# Altium footprint library Connector_127mm.PcbLib: 27 footprints (part 1 of 2)
Each footprint in its own frame and in the unit in brackets; x right, y up, seen from the top. Pads: shape width x height; smd on the part's side, far side on the other; paste and mask are expansions set on the pad; w line width, h text height; cw(c..) or ccw(c..) is an arc to the next point about the centre after c.
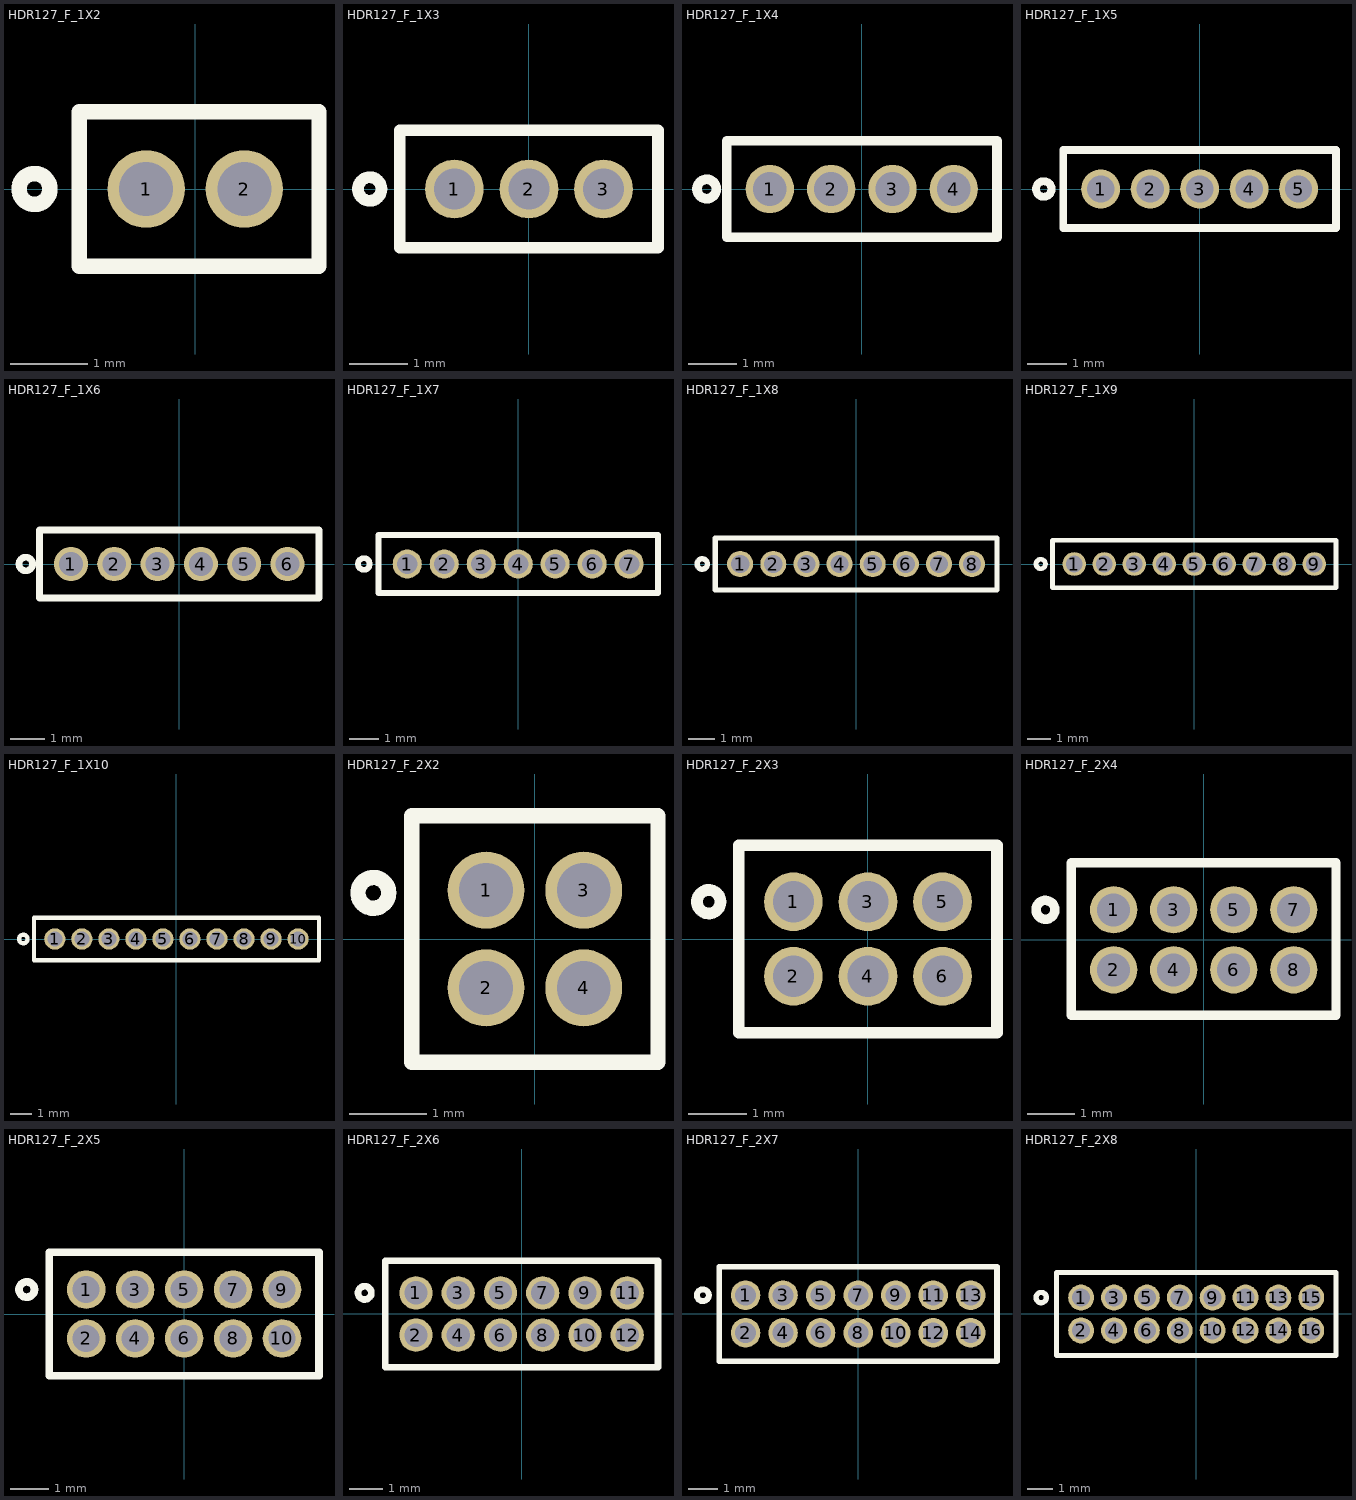
[diagram p0: the footprints below, top view; thin cyan lines are the x and y axes]

## HDR127_F_1X2 [mm] "mini header (50mil pitch)"
pads (2):
  round 1 / inner round 1 / far side oval 1x1.4 hole 0.7 mask+0.05: 1(-0.635,0) 2(0.635,0)
Top Overlay:
  circle w0.2: c-2.078,0 r0.2
  lines w0.2: -1.5,-1 -1.5,1 1.6,1 1.6,-1 -1.5,-1
3D body "female_header_a-bl127-eg-g02d.step": height 3.45, standoff -2.35, extent -1.47,-0.9 1.275,0.9

## HDR127_F_1X3 [mm] "mini header (50mil pitch)"
pads (3):
  round 1 / inner round 1 / far side oval 1x1.4 hole 0.7 mask+0.05: 1(-1.27,0) 2(0,0) 3(1.27,0)
Top Overlay:
  circle w0.2: c-2.713,0 r0.2
  lines w0.2: -2.2,-1 2.2,-1 2.2,1 -2.2,1 -2.2,-1
3D body "female_header_a-bl127-eg-g03d.stp": height 3.45, standoff -2.35, extent -2.105,-0.9 2.105,0.9

## HDR127_F_1X4 [mm] "mini header (50mil pitch)"
pads (4):
  round 1 / inner round 1 / far side oval 1x1.4 hole 0.7 mask+0.05: 1(-1.905,0) 2(-0.635,0) 3(0.635,0) 4(1.905,0)
Top Overlay:
  circle w0.2: c-3.213,0 r0.2
  lines w0.2: -2.8,-1 -2.8,1 2.8,1 2.8,-1 -2.8,-1
3D body "female_header_a-bl127-eg-g04d.stp": height 3.45, standoff -2.35, extent -2.74,-0.9 2.74,0.9

## HDR127_F_1X5 [mm] "mini header (50mil pitch)"
pads (5):
  round 1 / inner round 1 / far side oval 1x1.4 hole 0.7 mask+0.05: 1(-2.54,0) 2(-1.27,0) 3(0,0) 4(1.27,0) 5(2.54,0)
Top Overlay:
  circle w0.2: c-4,0 r0.2
  lines w0.2: -3.5,-1 -3.5,1 3.5,1 3.5,-1 -3.5,-1
3D body "female_header_a-bl127-eg-g05d.stp": height 3.45, standoff -2.35, extent -3.375,-0.9 3.375,0.9

## HDR127_F_1X6 [mm] "mini header (50mil pitch)"
pads (6):
  round 1 / inner round 1 / far side oval 1x1.4 hole 0.7 mask+0.05: 1(-3.175,0) 2(-1.905,0) 3(-0.635,0) 4(0.635,0) 5(1.905,0) 6(3.175,0)
Top Overlay:
  circle w0.2: c-4.5,0 r0.2
  lines w0.2: -4.1,-1 -4.1,1 4.1,1 4.1,-1 -4.1,-1
3D body "female_header_a-bl127-eg-g06d.stp": height 3.45, standoff -2.35, extent -4.01,-0.9 4.01,0.9

## HDR127_F_1X7 [mm] "mini header (50mil pitch)"
pads (7):
  round 1 / inner round 1 / far side oval 1x1.4 hole 0.7 mask+0.05: 1(-3.81,0) 2(-2.54,0) 3(-1.27,0) 4(0,0) 5(1.27,0) 6(2.54,0) 7(3.81,0)
Top Overlay:
  circle w0.2: c-5.3,0 r0.2
  lines w0.2: -4.8,-1 4.8,-1 4.8,1 -4.8,1 -4.8,-1
3D body "female_header_a-bl127-eg-g07d.stp": height 3.45, standoff -2.35, extent -4.645,-0.9 4.645,0.9

## HDR127_F_1X8 [mm] "mini header (50mil pitch)"
pads (8):
  round 1 / inner round 1 / far side oval 1x1.4 hole 0.7 mask+0.05: 1(-4.445,0) 2(-3.175,0) 3(-1.905,0) 4(-0.635,0) 5(0.635,0) 6(1.905,0) 7(3.175,0) 8(4.445,0)
Top Overlay:
  circle w0.2: c-5.9,0 r0.2
  lines w0.2: -5.4,-1 -5.4,1 5.4,1 5.4,-1 -5.4,-1
3D body "female_header_a-bl127-eg-g08d.stp": height 3.45, standoff -2.35, extent -5.28,-0.9 5.28,0.9

## HDR127_F_1X9 [mm] "mini header (50mil pitch)"
pads (9):
  round 1 / inner round 1 / far side oval 1x1.4 hole 0.7 mask+0.05: 1(-5.08,0) 2(-3.81,0) 3(-2.54,0) 4(-1.27,0) 5(0,0) 6(1.27,0) 7(2.54,0) 8(3.81,0) 9(5.08,0)
Top Overlay:
  circle w0.2: c-6.5,0 r0.2
  lines w0.2: -6,-1 -6,1 6,1 6,-1 -6,-1
3D body "female_header_a-bl127-eg-g09d.stp": height 3.45, standoff -2.35, extent -5.915,-0.9 5.915,0.9

## HDR127_F_1X10 [mm] "mini header (50mil pitch)"
pads (10):
  round 1 / inner round 1 / far side oval 1x1.4 hole 0.7 mask+0.05: 1(-5.715,0) 2(-4.445,0) 3(-3.175,0) 4(-1.905,0) 5(-0.635,0) 6(0.635,0) 7(1.905,0) 8(3.175,0) 9(4.445,0) 10(5.715,0)
Top Overlay:
  circle w0.2: c-7.2,0 r0.2
  lines w0.2: -6.7,-1 6.7,-1 6.7,1 -6.7,1 -6.7,-1
3D body "female_header_a-bl127-eg-g10d.stp": height 3.45, standoff -2.35, extent -6.55,-0.9 6.55,0.9

## HDR127_F_2X2 [mm] "mini header (50mil pitch)"
pads (4):
  round 1 hole 0.7 mask+0.05: 1(-0.635,0.635) 2(-0.635,-0.635) 3(0.635,0.635) 4(0.635,-0.635)
Top Overlay:
  circle w0.2: c-2.1,0.6 r0.2
  lines w0.2: -1.6,-1.6 1.6,-1.6 1.6,1.6 -1.6,1.6 -1.6,-1.6
3D body "female_header_a-bl127-eg-g02d.step": height 3.45, standoff -2.35, extent -1.47,-1.535 1.275,0.265
3D body "female_header_a-bl127-eg-g02d.step": height 3.45, standoff -2.35, extent -1.47,-0.265 1.275,1.535

## HDR127_F_2X3 [mm] "mini header (50mil pitch)"
pads (6):
  round 1 hole 0.7 mask+0.05: 1(-1.27,0.635) 2(-1.27,-0.635) 3(0,0.635) 4(0,-0.635) 5(1.27,0.635) 6(1.27,-0.635)
Top Overlay:
  circle w0.2: c-2.713,0.635 r0.2
  lines w0.2: -2.2,-1.6 -2.2,1.6 2.2,1.6 2.2,-1.6 -2.2,-1.6
3D body "female_header_a-bl127-eg-g03d.stp": height 3.45, standoff -2.35, extent -2.105,-1.535 2.105,0.265
3D body "female_header_a-bl127-eg-g03d.stp": height 3.45, standoff -2.35, extent -2.105,-0.265 2.105,1.535

## HDR127_F_2X4 [mm] "mini header (50mil pitch)"
pads (8):
  round 1 hole 0.7 mask+0.05: 1(-1.905,0.635) 2(-1.905,-0.635) 3(-0.635,0.635) 4(-0.635,-0.635) 5(0.635,0.635) 6(0.635,-0.635) 7(1.905,0.635) 8(1.905,-0.635)
Top Overlay:
  circle w0.2: c-3.348,0.635 r0.2
  lines w0.2: -2.8,-1.6 -2.8,1.635 2.8,1.635 2.8,-1.6 -2.8,-1.6
3D body "female_header_a-bl127-eg-g04d.stp": height 3.45, standoff -2.35, extent -2.74,-0.265 2.74,1.535
3D body "female_header_a-bl127-eg-g04d.stp": height 3.45, standoff -2.35, extent -2.74,-1.535 2.74,0.265

## HDR127_F_2X5 [mm] "mini header (50mil pitch)"
pads (10):
  round 1 hole 0.7 mask+0.05: 1(-2.54,0.635) 2(-2.54,-0.635) 3(-1.27,0.635) 4(-1.27,-0.635) 5(0,0.635) 6(0,-0.635) 7(1.27,0.635) 8(1.27,-0.635) 9(2.54,0.635) 10(2.54,-0.635)
Top Overlay:
  circle w0.2: c-4.083,0.635 r0.2
  lines w0.2: -3.5,-1.6 3.5,-1.6 3.5,1.6 -3.5,1.6 -3.5,-1.6
3D body "female_header_a-bl127-eg-g05d.stp": height 3.45, standoff -2.35, extent -3.375,-0.265 3.375,1.535
3D body "female_header_a-bl127-eg-g05d.stp": height 3.45, standoff -2.35, extent -3.375,-1.535 3.375,0.265

## HDR127_F_2X6 [mm] "mini header (50mil pitch)"
pads (12):
  round 1 hole 0.7 mask+0.05: 1(-3.175,0.635) 2(-3.175,-0.635) 3(-1.905,0.635) 4(-1.905,-0.635) 5(-0.635,0.635) 6(-0.635,-0.635) 7(0.635,0.635) 8(0.635,-0.635) 9(1.905,0.635) 10(1.905,-0.635) 11(3.175,0.635) 12(3.175,-0.635)
Top Overlay:
  circle w0.2: c-4.718,0.635 r0.2
  lines w0.2: -4.1,-1.6 -4.1,1.6 4.1,1.6 4.1,-1.6 -4.1,-1.6
3D body "female_header_a-bl127-eg-g06d.stp": height 3.45, standoff -2.35, extent -4.01,-0.265 4.01,1.535
3D body "female_header_a-bl127-eg-g06d.stp": height 3.45, standoff -2.35, extent -4.01,-1.535 4.01,0.265

## HDR127_F_2X7 [mm] "mini header (50mil pitch)"
pads (14):
  round 1 hole 0.7 mask+0.05: 1(-3.81,0.635) 2(-3.81,-0.635) 3(-2.54,0.635) 4(-2.54,-0.635) 5(-1.27,0.635) 6(-1.27,-0.635) 7(0,0.635) 8(0,-0.635) 9(1.27,0.635) 10(1.27,-0.635) 11(2.54,0.635) 12(2.54,-0.635) 13(3.81,0.635) 14(3.81,-0.635)
Top Overlay:
  circle w0.2: c-5.253,0.635 r0.2
  lines w0.2: -4.7,-1.6 -4.7,1.6 4.7,1.6 4.7,-1.6 -4.7,-1.6
3D body "female_header_a-bl127-eg-g07d.stp": height 3.45, standoff -2.35, extent -4.645,-0.265 4.645,1.535
3D body "female_header_a-bl127-eg-g07d.stp": height 3.45, standoff -2.35, extent -4.645,-1.535 4.645,0.265

## HDR127_F_2X8 [mm] "mini header (50mil pitch)"
pads (16):
  round 1 hole 0.7 mask+0.05: 1(-4.445,0.635) 2(-4.445,-0.635) 3(-3.175,0.635) 4(-3.175,-0.635) 5(-1.905,0.635) 6(-1.905,-0.635) 7(-0.635,0.635) 8(-0.635,-0.635) 9(0.635,0.635) 10(0.635,-0.635) 11(1.905,0.635) 12(1.905,-0.635) 13(3.175,0.635) 14(3.175,-0.635) 15(4.445,0.635) 16(4.445,-0.635)
Top Overlay:
  circle w0.2: c-5.988,0.635 r0.2
  lines w0.2: -5.4,-1.6 -5.4,1.6 5.4,1.6 5.4,-1.6 -5.4,-1.6
3D body "female_header_a-bl127-eg-g08d.stp": height 3.45, standoff -2.35, extent -5.28,-1.535 5.28,0.265
3D body "female_header_a-bl127-eg-g08d.stp": height 3.45, standoff -2.35, extent -5.28,-0.265 5.28,1.535